# Altium footprint library TXS0108EPWR.PcbLib: 3 footprints
Each footprint in its own frame and in the unit in brackets; x right, y up, seen from the top. Pads: shape width x height; smd on the part's side, far side on the other; paste and mask are expansions set on the pad; w line width, h text height; cw(c..) or ccw(c..) is an arc to the next point about the centre after c.
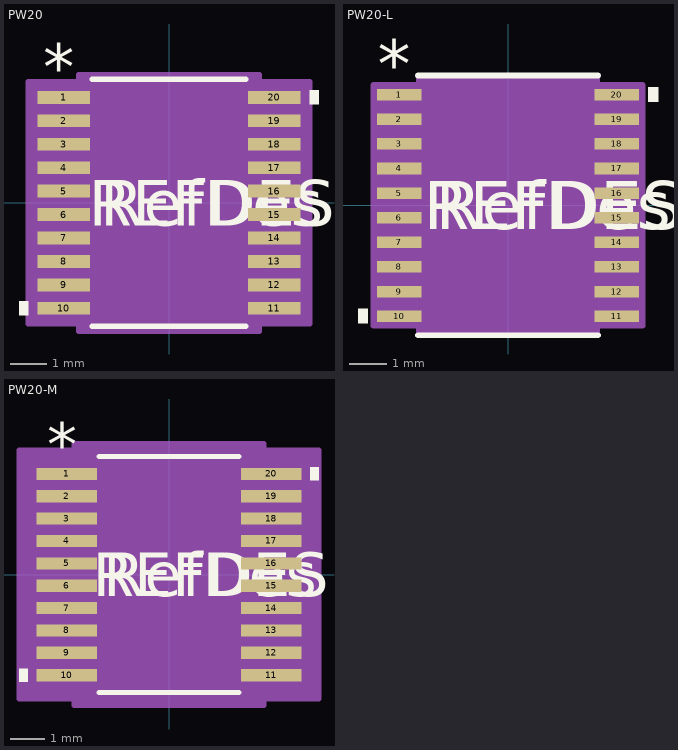
[diagram p0: the footprints below, top view; thin cyan lines are the x and y axes]

## PW20 [mm]
pads (20):
  rect 1.462x0.355 smd paste+0 mask+0: 1(-2.921,2.925) 2(-2.921,2.275) 3(-2.921,1.625) 4(-2.921,0.975) 5(-2.921,0.325) 6(-2.921,-0.325) 7(-2.921,-0.975) 8(-2.921,-1.625) 9(-2.921,-2.275) 10(-2.921,-2.925) 11(2.921,-2.925) 12(2.921,-2.275) 13(2.921,-1.625) 14(2.921,-0.975) 15(2.921,-0.325) 16(2.921,0.325) 17(2.921,0.975) 18(2.921,1.625) 19(2.921,2.275) 20(2.921,2.925)
Top Overlay:
  region: -3.906,-2.734 -4.16,-2.734 -4.16,-3.115 -3.906,-3.115
  region: 3.906,3.115 4.16,3.115 4.16,2.734 3.906,2.734
  lines w0.152: -2.126,-3.429 2.126,-3.429 ; -2.126,3.429 2.126,3.429
  text "*" at -3.492,3.153 h1.27
  text "RefDes" at -1.905,-0.635 h1.27
  text "REFDES" at -2.222,-0.635 h1.27
Mechanical 13:
  lines w0: -0.305,3.302 ccw(c0,3.302) 0.305,3.302
  lines w0.025: -3.302,-3.077 -3.302,-2.773 -2.248,-2.773 -2.248,-3.077 -3.302,-3.077 ; -3.302,-2.427 -3.302,-2.123 -2.248,-2.123 -2.248,-2.427 -3.302,-2.427 ; -3.302,-1.777 -3.302,-1.473 -2.248,-1.473 -2.248,-1.777 -3.302,-1.777 ; -3.302,-1.127 -3.302,-0.823 -2.248,-0.823 -2.248,-1.127 -3.302,-1.127 ; -3.302,-0.477 -3.302,-0.173 -2.248,-0.173 -2.248,-0.477 -3.302,-0.477 ; -3.302,0.173 -3.302,0.477 -2.248,0.477 -2.248,0.173 -3.302,0.173 ; -3.302,0.823 -3.302,1.127 -2.248,1.127 -2.248,0.823 -3.302,0.823 ; -3.302,1.473 -3.302,1.777 -2.248,1.777 -2.248,1.473 -3.302,1.473 ; -3.302,2.123 -3.302,2.427 -2.248,2.427 -2.248,2.123 -3.302,2.123 ; -3.302,2.773 -3.302,3.077 -2.248,3.077 -2.248,2.773 -3.302,2.773 ; -2.248,-3.302 2.248,-3.302 2.248,3.302 -2.248,3.302 -2.248,-3.302 ; 2.248,-3.077 2.248,-2.773 3.302,-2.773 3.302,-3.077 2.248,-3.077 ; 2.248,-2.427 2.248,-2.123 3.302,-2.123 3.302,-2.427 2.248,-2.427 ; 2.248,-1.777 2.248,-1.473 3.302,-1.473 3.302,-1.777 2.248,-1.777 ; 2.248,-1.127 2.248,-0.823 3.302,-0.823 3.302,-1.127 2.248,-1.127 ; 2.248,-0.477 2.248,-0.173 3.302,-0.173 3.302,-0.477 2.248,-0.477 ; 2.248,0.173 2.248,0.477 3.302,0.477 3.302,0.173 2.248,0.173 ; 2.248,0.823 2.248,1.127 3.302,1.127 3.302,0.823 2.248,0.823 ; 2.248,1.473 2.248,1.777 3.302,1.777 3.302,1.473 2.248,1.473 ; 2.248,2.123 2.248,2.427 3.302,2.427 3.302,2.123 2.248,2.123 ; 2.248,2.773 2.248,3.077 3.302,3.077 3.302,2.773 2.248,2.773
  text "*" at -2.184,1.956 h1.27
  text "RefDes2" at -2.222,-0.635 h1.27
Mechanical 15:
  region: -2.502,-3.356 -3.906,-3.356 -3.906,3.356 -2.502,3.356 -2.502,3.556 2.502,3.556 2.502,3.356 3.906,3.356 3.906,-3.356 2.502,-3.356 2.502,-3.556 -2.502,-3.556
  lines w0.152: -3.906,-3.356 -3.906,3.356 -2.502,3.356 -2.502,3.556 2.502,3.556 2.502,3.356 3.906,3.356 3.906,-3.356 2.502,-3.356 2.502,-3.556 -2.502,-3.556 -2.502,-3.356 -3.906,-3.356
3D body "PW20.step": height 1.2, standoff 0, extent -3.302,-3.302 3.302,3.302

## PW20-L [mm]
pads (20):
  rect 1.162x0.305 smd paste+0 mask+0: 1(-2.871,2.925) 2(-2.871,2.275) 3(-2.871,1.625) 4(-2.871,0.975) 5(-2.871,0.325) 6(-2.871,-0.325) 7(-2.871,-0.975) 8(-2.871,-1.625) 9(-2.871,-2.275) 10(-2.871,-2.925) 11(2.871,-2.925) 12(2.871,-2.275) 13(2.871,-1.625) 14(2.871,-0.975) 15(2.871,-0.325) 16(2.871,0.325) 17(2.871,0.975) 18(2.871,1.625) 19(2.871,2.275) 20(2.871,2.925)
Top Overlay:
  region: -3.706,-2.734 -3.96,-2.734 -3.96,-3.115 -3.706,-3.115
  region: 3.706,3.115 3.96,3.115 3.96,2.734 3.706,2.734
  lines w0.152: -2.375,-3.429 2.375,-3.429 ; -2.375,3.429 2.375,3.429
  text "*" at -3.443,3.103 h1.27
  text "RefDes" at -1.905,-0.635 h1.27
  text "REFDES" at -2.222,-0.635 h1.27
Mechanical 13:
  lines w0: -0.305,3.302 ccw(c0,3.302) 0.305,3.302
  lines w0.025: -3.302,-3.077 -3.302,-2.773 -2.248,-2.773 -2.248,-3.077 -3.302,-3.077 ; -3.302,-2.427 -3.302,-2.123 -2.248,-2.123 -2.248,-2.427 -3.302,-2.427 ; -3.302,-1.777 -3.302,-1.473 -2.248,-1.473 -2.248,-1.777 -3.302,-1.777 ; -3.302,-1.127 -3.302,-0.823 -2.248,-0.823 -2.248,-1.127 -3.302,-1.127 ; -3.302,-0.477 -3.302,-0.173 -2.248,-0.173 -2.248,-0.477 -3.302,-0.477 ; -3.302,0.173 -3.302,0.477 -2.248,0.477 -2.248,0.173 -3.302,0.173 ; -3.302,0.823 -3.302,1.127 -2.248,1.127 -2.248,0.823 -3.302,0.823 ; -3.302,1.473 -3.302,1.777 -2.248,1.777 -2.248,1.473 -3.302,1.473 ; -3.302,2.123 -3.302,2.427 -2.248,2.427 -2.248,2.123 -3.302,2.123 ; -3.302,2.773 -3.302,3.077 -2.248,3.077 -2.248,2.773 -3.302,2.773 ; -2.248,-3.302 2.248,-3.302 2.248,3.302 -2.248,3.302 -2.248,-3.302 ; 2.248,-3.077 2.248,-2.773 3.302,-2.773 3.302,-3.077 2.248,-3.077 ; 2.248,-2.427 2.248,-2.123 3.302,-2.123 3.302,-2.427 2.248,-2.427 ; 2.248,-1.777 2.248,-1.473 3.302,-1.473 3.302,-1.777 2.248,-1.777 ; 2.248,-1.127 2.248,-0.823 3.302,-0.823 3.302,-1.127 2.248,-1.127 ; 2.248,-0.477 2.248,-0.173 3.302,-0.173 3.302,-0.477 2.248,-0.477 ; 2.248,0.173 2.248,0.477 3.302,0.477 3.302,0.173 2.248,0.173 ; 2.248,0.823 2.248,1.127 3.302,1.127 3.302,0.823 2.248,0.823 ; 2.248,1.473 2.248,1.777 3.302,1.777 3.302,1.473 2.248,1.473 ; 2.248,2.123 2.248,2.427 3.302,2.427 3.302,2.123 2.248,2.123 ; 2.248,2.773 2.248,3.077 3.302,3.077 3.302,2.773 2.248,2.773
  text "*" at -2.184,1.956 h1.27
  text "RefDes2" at -2.222,-0.635 h1.27
Mechanical 15:
  region: -2.349,-3.179 -3.554,-3.179 -3.554,3.179 -2.349,3.179 -2.349,3.404 2.349,3.404 2.349,3.179 3.554,3.179 3.554,-3.179 2.349,-3.179 2.349,-3.404 -2.349,-3.404
  lines w0.152: -3.554,-3.179 -3.554,3.179 -2.349,3.179 -2.349,3.404 2.349,3.404 2.349,3.179 3.554,3.179 3.554,-3.179 2.349,-3.179 2.349,-3.404 -2.349,-3.404 -2.349,-3.179 -3.554,-3.179
3D body "PW20.step": height 1.2, standoff 0, extent -3.302,-3.302 3.302,3.302

## PW20-M [mm]
pads (20):
  rect 1.762x0.355 smd paste+0 mask+0: 1(-2.971,2.925) 2(-2.971,2.275) 3(-2.971,1.625) 4(-2.971,0.975) 5(-2.971,0.325) 6(-2.971,-0.325) 7(-2.971,-0.975) 8(-2.971,-1.625) 9(-2.971,-2.275) 10(-2.971,-2.925) 11(2.971,-2.925) 12(2.971,-2.275) 13(2.971,-1.625) 14(2.971,-0.975) 15(2.971,-0.325) 16(2.971,0.325) 17(2.971,0.975) 18(2.971,1.625) 19(2.971,2.275) 20(2.971,2.925)
Top Overlay:
  region: -4.106,-2.734 -4.36,-2.734 -4.36,-3.115 -4.106,-3.115
  region: 4.106,3.115 4.36,3.115 4.36,2.734 4.106,2.734
  lines w0.152: -2.026,-3.429 2.026,-3.429 ; -2.026,3.429 2.026,3.429
  text "*" at -3.542,3.153 h1.27
  text "RefDes" at -1.905,-0.635 h1.27
  text "REFDES" at -2.222,-0.635 h1.27
Mechanical 13:
  lines w0: -0.305,3.302 ccw(c0,3.302) 0.305,3.302
  lines w0.025: -3.302,-3.077 -3.302,-2.773 -2.248,-2.773 -2.248,-3.077 -3.302,-3.077 ; -3.302,-2.427 -3.302,-2.123 -2.248,-2.123 -2.248,-2.427 -3.302,-2.427 ; -3.302,-1.777 -3.302,-1.473 -2.248,-1.473 -2.248,-1.777 -3.302,-1.777 ; -3.302,-1.127 -3.302,-0.823 -2.248,-0.823 -2.248,-1.127 -3.302,-1.127 ; -3.302,-0.477 -3.302,-0.173 -2.248,-0.173 -2.248,-0.477 -3.302,-0.477 ; -3.302,0.173 -3.302,0.477 -2.248,0.477 -2.248,0.173 -3.302,0.173 ; -3.302,0.823 -3.302,1.127 -2.248,1.127 -2.248,0.823 -3.302,0.823 ; -3.302,1.473 -3.302,1.777 -2.248,1.777 -2.248,1.473 -3.302,1.473 ; -3.302,2.123 -3.302,2.427 -2.248,2.427 -2.248,2.123 -3.302,2.123 ; -3.302,2.773 -3.302,3.077 -2.248,3.077 -2.248,2.773 -3.302,2.773 ; -2.248,-3.302 2.248,-3.302 2.248,3.302 -2.248,3.302 -2.248,-3.302 ; 2.248,-3.077 2.248,-2.773 3.302,-2.773 3.302,-3.077 2.248,-3.077 ; 2.248,-2.427 2.248,-2.123 3.302,-2.123 3.302,-2.427 2.248,-2.427 ; 2.248,-1.777 2.248,-1.473 3.302,-1.473 3.302,-1.777 2.248,-1.777 ; 2.248,-1.127 2.248,-0.823 3.302,-0.823 3.302,-1.127 2.248,-1.127 ; 2.248,-0.477 2.248,-0.173 3.302,-0.173 3.302,-0.477 2.248,-0.477 ; 2.248,0.173 2.248,0.477 3.302,0.477 3.302,0.173 2.248,0.173 ; 2.248,0.823 2.248,1.127 3.302,1.127 3.302,0.823 2.248,0.823 ; 2.248,1.473 2.248,1.777 3.302,1.777 3.302,1.473 2.248,1.473 ; 2.248,2.123 2.248,2.427 3.302,2.427 3.302,2.123 2.248,2.123 ; 2.248,2.773 2.248,3.077 3.302,3.077 3.302,2.773 2.248,2.773
  text "*" at -2.184,1.956 h1.27
  text "RefDes2" at -2.222,-0.635 h1.27
Mechanical 15:
  region: -2.756,-3.61 -4.36,-3.61 -4.36,3.61 -2.756,3.61 -2.756,3.81 2.756,3.81 2.756,3.61 4.36,3.61 4.36,-3.61 2.756,-3.61 2.756,-3.81 -2.756,-3.81
  lines w0.152: -4.36,-3.61 -4.36,3.61 -2.756,3.61 -2.756,3.81 2.756,3.81 2.756,3.61 4.36,3.61 4.36,-3.61 2.756,-3.61 2.756,-3.81 -2.756,-3.81 -2.756,-3.61 -4.36,-3.61
3D body "PW20.step": height 1.2, standoff 0, extent -3.302,-3.302 3.302,3.302